# Altium footprint library PcbLib1.PcbLib: 332 footprints (part 19 of 22)
Each footprint in its own frame and in the unit in brackets; x right, y up, seen from the top. Pads: shape width x height; smd on the part's side, far side on the other; paste and mask are expansions set on the pad; w line width, h text height; cw(c..) or ccw(c..) is an arc to the next point about the centre after c.
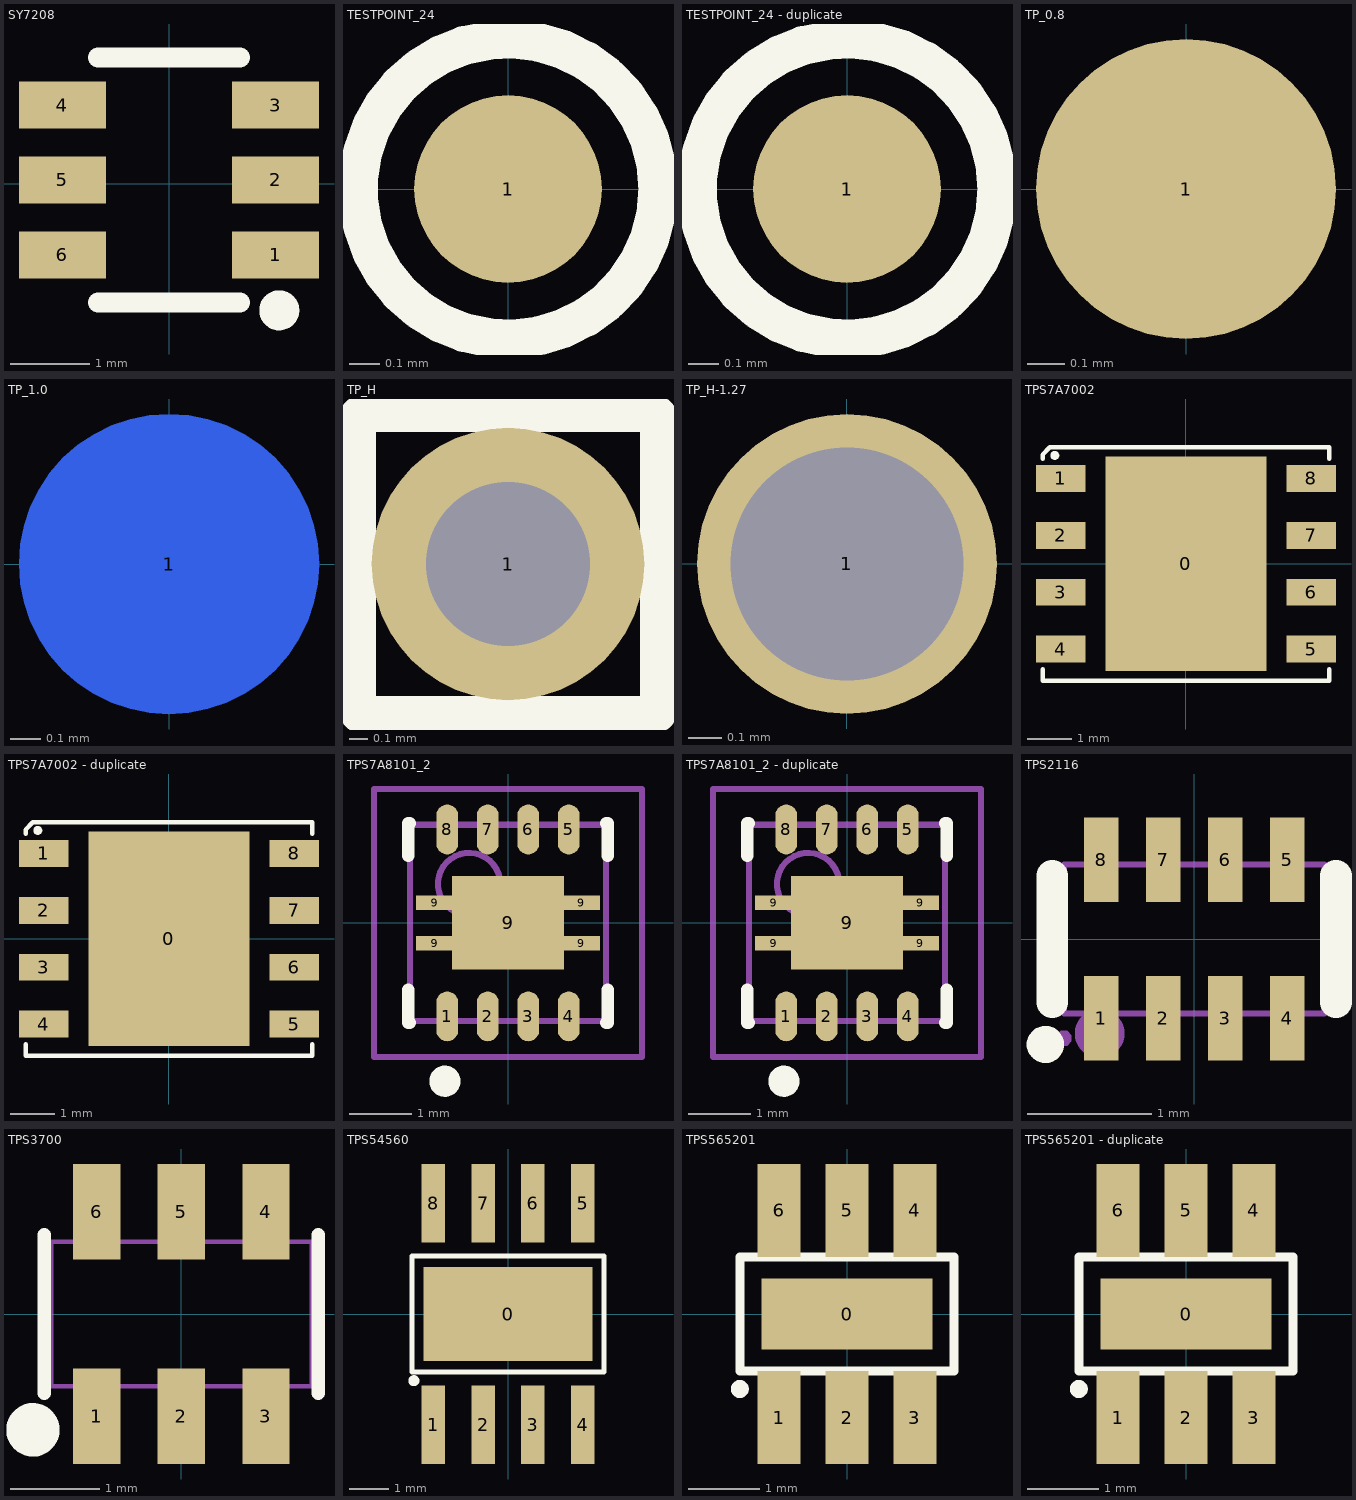
[diagram p18: the footprints below, top view; thin cyan lines are the x and y axes]

## SY7208 [mm] "DC-DC升压芯片"
pads (6):
  rect 1.1x0.6 smd paste+0 mask+0.051: 1(1.35,-0.899) 2(1.35,0.051) 3(1.35,1.001) 4(-1.35,1.001) 5(-1.35,0.051) 6(-1.35,-0.899)
Top Overlay:
  circle w0.254: c1.397,-1.6 r0.127
  lines w0.254: -0.9,-1.5 0.9,-1.5 ; -0.9,1.6 0.9,1.6
Mechanical 15:
  circle w0.2: c1.4,-0.899 r0.1

## TESTPOINT_24 [mil]
pads (1):
  round 24 smd: 1(0,0)
Top Overlay:
  circle w5: c0,0 r19.2

## TESTPOINT_24 - duplicate [mil]
pads (1):
  round 24 smd: 1(0,0)
Top Overlay:
  circle w5: c0,0 r19.2

## TP_0.8 [mm]
pads (1):
  round 0.8 smd: 1(0,0)

## TP_1.0 [mm]
height 1
pads (1):
  round 1 smd far side: 1(0,0)

## TP_H [mm]
height 1
pads (1):
  round 1.5 hole 0.9: 1(0,0)
Top Overlay:
  lines w0.2: -0.825,-0.825 -0.825,0.825 0.825,0.825 0.825,-0.825 -0.825,-0.825

## TP_H-1.27 [mm]
height 1
pads (1):
  round 0.9 hole 0.7: 1(0,0)

## TPS7A7002 [mm]
height 0.15
pads (9):
  rect 3.6x4.8 smd: 0(0,0)
  rect 1.1x0.6 smd: 1(-2.8,1.905) 2(-2.8,0.635) 3(-2.8,-0.635) 4(-2.8,-1.905) 5(2.8,-1.905) 6(2.8,-0.635) 7(2.8,0.635) 8(2.8,1.905)
Top Overlay:
  circle w0.1: c-2.93,2.42 r0.05
  lines w0.1: -3.2,-2.36 -3.2,-2.61 0,-2.61 3.2,-2.61 3.2,-2.36 ; -3.2,2.35 -3.2,2.413 -3.2,2.44 -3.04,2.6 0,2.6 3.2,2.6 3.2,2.35

## TPS7A7002 - duplicate [mm]
height 0.15
pads (9):
  rect 3.6x4.8 smd: 0(0,0)
  rect 1.1x0.6 smd: 1(-2.8,1.905) 2(-2.8,0.635) 3(-2.8,-0.635) 4(-2.8,-1.905) 5(2.8,-1.905) 6(2.8,-0.635) 7(2.8,0.635) 8(2.8,1.905)
Top Overlay:
  circle w0.1: c-2.93,2.42 r0.05
  lines w0.1: -3.2,-2.36 -3.2,-2.61 0,-2.61 3.2,-2.61 3.2,-2.36 ; -3.2,2.35 -3.2,2.413 -3.2,2.44 -3.04,2.6 0,2.6 3.2,2.6 3.2,2.35

## TPS7A8101_2 [mm]
height 1
pads (13):
  oval 0.35x0.8 smd: 1(-0.975,-1.5) 2(-0.325,-1.5) 3(0.325,-1.5) 4(0.975,-1.5) 5(0.975,1.5) 6(0.325,1.5) 7(-0.325,1.5) 8(-0.975,1.5)
  rect 0.6x0.23 smd: 9(-1.177,-0.325) 9(-1.177,0.325) 9(1.177,-0.325) 9(1.177,0.325)
  rect 1.8x1.5 smd: 9(0,0)
Top Overlay:
  circle w0.25: c-1.014,-2.54 r0.125
  lines w0.2: -1.6,-1.075 -1.6,-1.6 -1.575,-1.6 ; -1.6,1.075 -1.6,1.6 -1.575,1.6 ; 1.575,-1.6 1.6,-1.6 1.6,-1.075 ; 1.575,1.6 1.6,1.6 1.6,1.075
Mechanical 13:
  circle w0.1: c-0.625,0.625 r0.5
  lines w0.1: -1.575,-1.575 1.575,-1.575 1.575,1.575 -1.575,1.575 -1.575,-1.575
Mechanical 15:
  lines w0.1: -2.15,-2.15 2.15,-2.15 2.15,2.15 -2.15,2.15 -2.15,-2.15
3D body: height 1, standoff 0.05, extent -1.575,-1.575 1.575,1.575

## TPS7A8101_2 - duplicate [mm]
height 1
pads (13):
  oval 0.35x0.8 smd: 1(-0.975,-1.5) 2(-0.325,-1.5) 3(0.325,-1.5) 4(0.975,-1.5) 5(0.975,1.5) 6(0.325,1.5) 7(-0.325,1.5) 8(-0.975,1.5)
  rect 0.6x0.23 smd: 9(-1.177,-0.325) 9(-1.177,0.325) 9(1.177,-0.325) 9(1.177,0.325)
  rect 1.8x1.5 smd: 9(0,0)
Top Overlay:
  circle w0.25: c-1.014,-2.54 r0.125
  lines w0.2: -1.6,-1.075 -1.6,-1.6 -1.575,-1.6 ; -1.6,1.075 -1.6,1.6 -1.575,1.6 ; 1.575,-1.6 1.6,-1.6 1.6,-1.075 ; 1.575,1.6 1.6,1.6 1.6,1.075
Mechanical 13:
  circle w0.1: c-0.625,0.625 r0.5
  lines w0.1: -1.575,-1.575 -1.575,1.575 1.575,1.575 1.575,-1.575 -1.575,-1.575
Mechanical 15:
  lines w0.1: -2.15,-2.15 -2.15,2.15 2.15,2.15 2.15,-2.15 -2.15,-2.15
3D body: height 1, standoff 0.05, extent -1.575,-1.575 1.575,1.575

## TPS2116 [mm]
pads (8):
  rect 0.28x0.68 smd: 1(-0.75,-0.64) 2(-0.25,-0.64) 3(0.25,-0.64) 4(0.75,-0.64) 5(0.75,0.64) 6(0.25,0.64) 7(-0.25,0.64) 8(-0.75,0.64)
Top Overlay:
  circle w0.15: c-1.2,-0.85 r0.075
  lines w0.254: -1.143,-0.508 -1.143,0.508 ; 1.143,-0.508 1.143,0.508
Mechanical 2:
  circle w0.2: c-0.762,-0.762 r0.1
Mechanical 6:
  lines w0.051: -1.05,-0.6 -1.05,0.6 1.05,0.6 1.05,-0.6 -1.05,-0.6
Mechanical 8:
  region: -0.99,-0.8 -0.99,-0.825 -1.025,-0.86 -1.075,-0.86 -1.11,-0.825 -1.11,-0.8 -1.11,-0.775 -1.075,-0.74 -1.025,-0.74 -0.99,-0.775 -0.99,-0.8
Mechanical 9:
  region: -0.64,-0.8 -0.64,-0.5 -0.86,-0.5 -0.86,-0.8
  region: -0.14,-0.8 -0.14,-0.5 -0.36,-0.5 -0.36,-0.8
  region: 0.36,-0.8 0.36,-0.5 0.14,-0.5 0.14,-0.8
  region: 0.86,-0.8 0.86,-0.5 0.64,-0.5 0.64,-0.8
  region: 0.86,0.8 0.86,0.5 0.64,0.5 0.64,0.8
  region: 0.36,0.8 0.36,0.5 0.14,0.5 0.14,0.8
  region: -0.14,0.8 -0.14,0.5 -0.36,0.5 -0.36,0.8
  region: -0.64,0.8 -0.64,0.5 -0.86,0.5 -0.86,0.8

## TPS3700 [mm]
pads (6):
  rect 0.532x1.072 smd: 1(-0.95,-1.149) 2(0,-1.149) 3(0.95,-1.149) 4(0.95,1.149) 5(0,1.149) 6(-0.95,1.149)
Top Overlay:
  circle w0.3: c-1.668,-1.301 r0.15
  lines w0.152: -1.539,-0.889 -1.539,0.889 ; 1.539,-0.889 1.539,0.889
Mechanical 6:
  lines w0.051: -1.463,-0.813 -1.463,0.813 1.463,0.813 1.463,-0.813 -1.463,-0.813
Mechanical 7:
  region: -1.165,0.935 -0.735,0.935 -0.735,0.803 -1.165,0.803
  region: -0.215,0.935 0.215,0.935 0.215,0.803 -0.215,0.803
  region: 0.735,0.935 1.165,0.935 1.165,0.803 0.735,0.803
  region: 0.735,-0.803 1.165,-0.803 1.165,-0.935 0.735,-0.935
  region: -0.215,-0.803 0.215,-0.803 0.215,-0.935 -0.215,-0.935
  region: -1.165,-0.803 -0.735,-0.803 -0.735,-0.935 -1.165,-0.935
Mechanical 8:
  region: -1.403,-1.4 -1.403,-1.425 -1.438,-1.46 -1.488,-1.46 -1.523,-1.425 -1.523,-1.4 -1.523,-1.375 -1.488,-1.34 -1.438,-1.34 -1.403,-1.375 -1.403,-1.4
Mechanical 9:
  region: -1.165,0.925 -0.735,0.925 -0.735,1.4 -1.165,1.4
  region: -0.215,0.925 0.215,0.925 0.215,1.4 -0.215,1.4
  region: 0.735,0.925 1.165,0.925 1.165,1.4 0.735,1.4
  region: 0.735,-0.925 1.165,-0.925 1.165,-1.4 0.735,-1.4
  region: -0.215,-0.925 0.215,-0.925 0.215,-1.4 -0.215,-1.4
  region: -1.165,-0.925 -0.735,-0.925 -0.735,-1.4 -1.165,-1.4

## TPS54560 [mm]
height 0.9
pads (9):
  rect 4.3x2.4 smd: 0(0,0)
  rect 0.6x2 smd: 1(-1.905,-2.825) 2(-0.635,-2.825) 3(0.635,-2.825) 4(1.905,-2.825) 5(1.905,2.825) 6(0.635,2.825) 7(-0.635,2.825) 8(-1.905,2.825)
Top Overlay:
  circle w0.18: c-2.4,-1.7 r0.05
  lines w0.127: -2.45,-1.475 2.45,-1.475 2.45,1.475 -2.45,1.475 -2.45,-1.475

## TPS565201 [mm]
height 0.9
pads (7):
  rect 2.4x1 smd: 0(0,0)
  rect 0.6x1.3 smd: 1(-0.95,-1.45) 2(0,-1.45) 3(0.95,-1.45) 4(0.95,1.45) 5(0,1.45) 6(-0.95,1.45)
Top Overlay:
  circle w0.15: c-1.5,-1.05 r0.05
  lines w0.127: -1.5,-0.8 -1.5,0.8 1.5,0.8 1.5,-0.8 -1.5,-0.8

## TPS565201 - duplicate [mm]
height 0.9
pads (7):
  rect 2.4x1 smd: 0(0,0)
  rect 0.6x1.3 smd: 1(-0.95,-1.45) 2(0,-1.45) 3(0.95,-1.45) 4(0.95,1.45) 5(0,1.45) 6(-0.95,1.45)
Top Overlay:
  circle w0.15: c-1.5,-1.05 r0.05
  lines w0.127: -1.5,-0.8 -1.5,0.8 1.5,0.8 1.5,-0.8 -1.5,-0.8